# Altium schematic symbol library Resistor.SchLib: 1085 symbols (part 1 of 29)
Pins are listed as number, name and electrical type; pins without a type are passive.

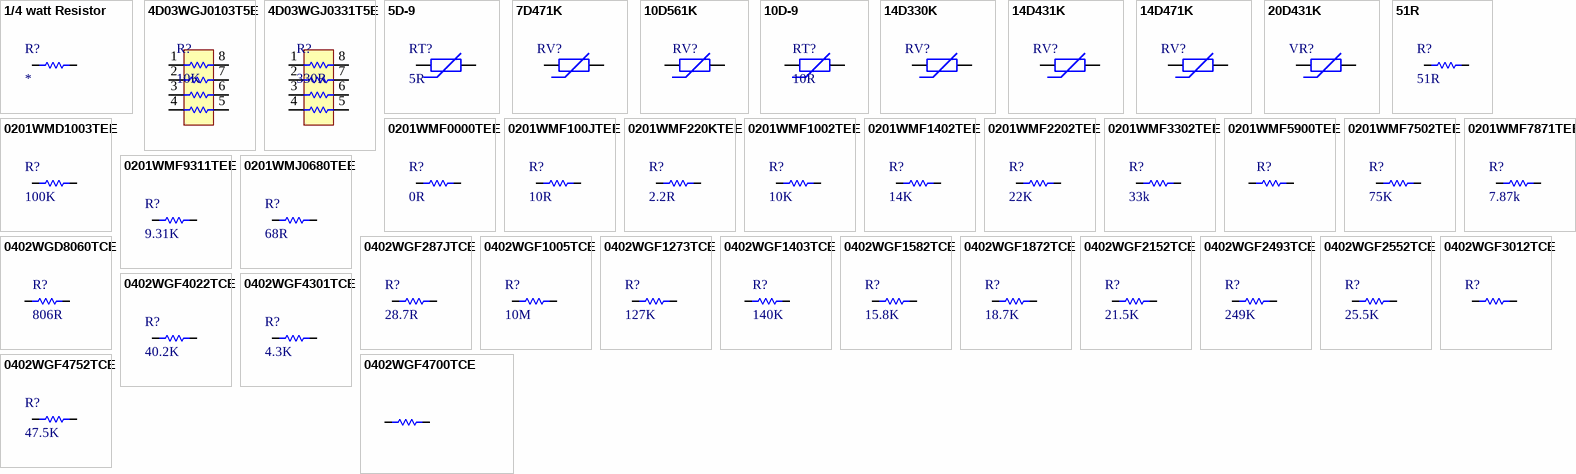
[diagram p0: symbols 1/4 watt Resistor to 0402WGF4752TCE]

## 1/4 watt Resistor
designator R?
footprint 1/4 WATT RESISTOR
pins: 1, 2

## 4D03WGJ0103T5E
designator R?, comment 10K
4 ±5% 10kΩ 62.5mW ±200ppm/℃ 0603x4 Resistor Networks, Arrays ROHS; Manufacturer: Royal Electronic Factory; Manufacturer Part Number: 4D03WGJ0103T5E; Value: 10kR; Temperature Coefficient: 400ppm/°C; Supplier: Mouser; LCSC Part Number: C29718; RoHS: No; Item Type: Resistor; Pricing: 10000=0.005 (USD); ComponentLink1URL: https://datasheet.octopart.com/4D03WGJ0103T5E-Royal-Ohm-datasheet-158295248.pdf?src-supplier=TME; ComponentLink1Description: https://datasheet.octopart.com/4D03WGJ0103T5E-Royal-Ohm-datasheet-158295248.pdf?src-supplier=TME
footprint 0603x4
pins: 1, 2, 3, 4, 5, 6, 7, 8

## 4D03WGJ0331T5E
designator R?, comment 330R
4 8 ±5% 330Ω 62.5mW ±200ppm/℃ 0603x4 Resistor Networks & Arrays ROHS; Manufacturer: UNI-ROYAL(Uniroyal Elec); Manufacturer Part Number: 4D03WGJ0331T5E; Package: 0603x4; LCSC Part Number: C12018; Item Type: Resistor; ComponentLink1Description: LCSC; ComponentLink1URL: https://www.lcsc.com/product-detail/span-style-background-color-ff0-Resistor-span-Networks-Arrays_UNI-ROYAL-Uniroyal-Elec-4D03WGJ0331T5E_C12018.html
footprint Resistor 0603x4
pins: 1, 2, 3, 4, 5, 6, 7, 8

## 5D-9
designator RT?, comment 5R
5Ω 3A 2700K Plugin,P=7.5mm NTC Thermistors ROHS; Manufacturer: Hongzhi; Manufacturer Part Number: 5D-9; Package: Plugin,P=7.5mm; LCSC Part Number: C332361; Item Type: NTC Thermistor; ComponentLink1Description: LCSC; ComponentLink1URL: https://www.lcsc.com/product-detail/NTC-Thermistors_Hongzhi-Elec-5D-9_C332361.html
footprint 5D-9
pins: 1, 2

## 7D471K
designator RV?
775V 385V 300V 423V~517V Plugin Varistors ROHS; Manufacturer: Hongzhi Elec; Manufacturer Part Number: 7D471K; Package: Plugin; JLCPCB Part Number: C111187; Item Type: Varistor; ComponentLink1Description: LCSC; ComponentLink1URL: https://www.lcsc.com/product-detail/Varistors_Hongzhi-Elec-7D471K_C111187.html
footprint 7D471K
pins: 1, 2

## 10D561K
designator RV?
925V 460V 350V 504V~616V Plugin,P=7.5mm Varistors ROHS; Manufacturer: Hongzhi Elec; Manufacturer Part Number: 10D561K; Package: Plugin,P=7.5mm; LCSC Part Number: C113236; Item Type: Varistor; ComponentLink1Description: LCSC; ComponentLink1URL: https://www.lcsc.com/product-detail/Varistors_Hongzhi-Elec-10D561K_C113236.html
footprint 10D561K
pins: 1, 2

## 10D-9
designator RT?, comment 10R
10Ω 2A 2700K Plugin,P=7.5mm NTC Thermistors ROHS; Manufacturer: SURGING; Manufacturer Part Number: 10D-9; Package: Plugin,P=7.5mm; LCSC Part Number: C2839611; Item Type: NTC Thermistor; ComponentLink1Description: LCSC; ComponentLink1URL: https://www.lcsc.com/product-detail/NTC-Thermistors_SURGING-10D-9_C2839611.html
footprint 10D-9
pins: 1, 2

## 14D330K
designator RV?
65V 5.9J 8500pF@1kHz 26V 20V 30V~36V 1kA Radial Leaded Varistors ROHS; Manufacturer: SEMBO; Manufacturer Part Number: 14D330K; Item Type: Thermistor; Footprint: Plugin; ComponentLink1Description: LCSC; ComponentLink1URL: https://lcsc.com/product-detail/Varistors_Hongzhi-Elec-14D330K_C137829.html; LCSC Part Number: C782663
footprint 14D330K_
pins: 1, 2

## 14D431K
designator RV?
710V 350V 275V 387V~473V Plugin Varistors ROHS; Manufacturer: Hongzhi Elec; Manufacturer Part Number: 14D431K; Package: Plugin; LCSC Part Number: C137830; Item Type: Varistor; ComponentLink1Description: LCSC; ComponentLink1URL: https://www.lcsc.com/product-detail/Varistors_Hongzhi-Elec-14D431K_C137830.html
footprint 14D431K
pins: 1, 2

## 14D471K
designator RV?
775V 385V 300V 423V~517V Plugin Varistors ROHS; Manufacturer: COV; Manufacturer Part Number: 14D471K; Package: Plugin; LCSC Part Number: C317828; Item Type: Varistor; ComponentLink1Description: LCSC; ComponentLink1URL: https://www.lcsc.com/product-detail/Varistors_COV-14D471K_C317828.html
footprint 14d471k
pins: 1, 2

## 20D431K
designator VR?
710V 350V 275V Through Hole,P=10mm Varistors ROHS; Manufacturer: SURGING; Manufacturer Part Number: 20D431K; Package: Through Hole,P=10mm; LCSC Part Number: C2839534; Item Type: Varistor; ComponentLink1Description: LCSC; ComponentLink1URL: https://www.lcsc.com/product-detail/C2839534.html
footprint 20D431K
pins: 1, 2

## 51R
designator R?
SMD 2512 1% Resistor 51R 1W; Manufacturer: IBUW; Manufacturer Part Number: 51R 1W; Value: 51R; Package: 2512; ComponentLink1Description: Aliexpress; ComponentLink1URL: https://fr.aliexpress.com/item/1005004709078383.html?spm=a2g0o.productlist.main.57.6d95f397cf7gmb&algo_pvid=edcdcb7e-db68-42b8-a831-237760419952&algo_exp_id=edcdcb7e-db68-42b8-a831-237760419952-28&pdp_npi=4%40dis%21USD%211.74%211.13%21%21%211.74%21%21%40210321dc17013352231813956e2690%2112000030183281143%21sea%21FR%210%21AB&curPageLogUid=DS5ZvT9x3Or6; Item Type: Resistor
footprint RES-2512
pins: 1, 2

## 0201WMD1003TEE
designator R?, comment 100K
50mW Thick Film Resistors ±0.5% 100kΩ 0201 Chip Resistor - Surface Mount ROHS; Manufacturer: UNI-ROYAL; Manufacturer Part Number: 0201WMD1003TEE; Package: 0201; LCSC Part Number: C778396; Item Type: Resistor; ComponentLink1Description: LCSC; ComponentLink1URL: https://www.lcsc.com/product-detail/Chip-Resistor-Surface-Mount_UNI-ROYAL-Uniroyal-Elec-0201WMD1003TEE_C778396.html
footprint Res-0201
pins: 1, 2

## 0201WMF0000TEE
designator R?, comment 0R
50mW Thick Film Resistors 25V ±1% 0Ω 0201 Chip Resistor - Surface Mount ROHS; Manufacturer: UNI-ROYAL; Manufacturer Part Number: 0201WMF0000TEE; Package: 0201; LCSC Part Number: C473473; Item Type: Resistor; ComponentLink1Description: LCSC; ComponentLink1URL: https://www.lcsc.com/product-detail/Chip-Resistor-Surface-Mount_UNI-ROYAL-Uniroyal-Elec-0201WMF0000TEE_C473473.html
footprint Res-0201
pins: 1, 2

## 0201WMF100JTEE
designator R?, comment 10R
50mW Thick Film Resistors 25V ±1% ±200ppm/℃ 10Ω 0201 Chip Resistor - Surface Mount ROHS; Manufacturer: UNI-ROYAL; Manufacturer Part Number: 0201WMF100JTEE; Package: 0201; LCSC Part Number: C270817; Item Type: Resistor; ComponentLink1Description: LCSC; ComponentLink1URL: https://www.lcsc.com/product-detail/Chip-Resistor-Surface-Mount_UNI-ROYAL-Uniroyal-Elec-0201WMF100JTEE_C270817.html
footprint Res-0201
pins: 1, 2

## 0201WMF220KTEE
designator R?, comment 2.2R
50mW Thick Film Resistors 25V ±1% -100ppm/℃~+350ppm/℃ 2.2Ω 0201 Chip Resistor - Surface Mount ROHS; Manufacturer: UNI-ROYAL; Manufacturer Part Number: 0201WMF220KTEE; Package: 0201; LCSC Part Number: C473517; Item Type: Resistor; ComponentLink1Description: LCSC; ComponentLink1URL: https://www.lcsc.com/product-detail/Chip-Resistor-Surface-Mount_UNI-ROYAL-Uniroyal-Elec-0201WMF220KTEE_C473517.html
footprint Res-0201
pins: 1, 2

## 0201WMF1002TEE
designator R?, comment 10K
50mW Thick Film Resistors 25V ±1% ±200ppm/℃ 10kΩ 0201 Chip Resistor - Surface Mount ROHS; Manufacturer: UNI-ROYAL; Manufacturer Part Number: 0201WMF1002TEE; Package: 0201; LCSC Part Number: C473048; Item Type: Resistor; ComponentLink1Description: LCSC; ComponentLink1URL: https://www.lcsc.com/product-detail/Chip-Resistor-Surface-Mount_UNI-ROYAL-Uniroyal-Elec-0201WMF1002TEE_C473048.html
footprint Res-0201
pins: 1, 2

## 0201WMF1402TEE
designator R?, comment 14K
50mW Thick Film Resistor 25V ±1% ±200ppm/℃ 14kΩ 0201 Chip Resistor - Surface Mount ROHS; Manufacturer: UNI-ROYAL; Manufacturer Part Number: 0201WMF1402TEE; Package: 0201; LCSC Part Number: C474280; Item Type: Resistor; ComponentLink1Description: LCSC; ComponentLink1URL: https://www.lcsc.com/product-detail/C474280.html
footprint Res-0201
pins: 1, 2

## 0201WMF2202TEE
designator R?, comment 22K
50mW Thick Film Resistors ±1% ±200ppm/℃ 22kΩ 0201 Chip Resistor - Surface Mount ROHS; Manufacturer: UNI-ROYAL; Manufacturer Part Number: 0201WMF2202TEE; Package: 0201; LCSC Part Number: C473469; Item Type: Resistor; ComponentLink1Description: LCSC; ComponentLink1URL: https://www.lcsc.com/product-detail/Chip-Resistor-Surface-Mount_UNI-ROYAL-Uniroyal-Elec-0201WMF2202TEE_C473469.html
footprint Res-0201
pins: 1, 2

## 0201WMF3302TEE
designator R?, comment 33k
50mW Thick Film Resistors ±1% ±200ppm/℃ 33kΩ 0201 Chip Resistor - Surface Mount ROHS; Manufacturer: UNI-ROYAL; Manufacturer Part Number: 0201WMF3302TEE; Package: 0201; LCSC Part Number: C473534; Item Type: Resistor; ComponentLink1Description: LCSC; ComponentLink1URL: https://www.lcsc.com/product-detail/Chip-Resistor-Surface-Mount_UNI-ROYAL-Uniroyal-Elec-0201WMF3302TEE_C473534.html
footprint Res-0201
pins: 1, 2

## 0201WMF5900TEE
designator R?
50mW Thick Film Resistors 25V ±1% ±200ppm/℃ 590Ω 0201 Chip Resistor - Surface Mount ROHS; Manufacturer: UNI-ROYAL; Manufacturer Part Number: 0201WMF5900TEE; Package: 0201; LCSC Part Number: C474302; Item Type: Resistor; ComponentLink1Description: LCSC; ComponentLink1URL: https://www.lcsc.com/product-detail/Chip-Resistor-Surface-Mount_UNI-ROYAL-Uniroyal-Elec-0201WMF5900TEE_C474302.html
footprint Res-0201
pins: 1, 2

## 0201WMF7502TEE
designator R?, comment 75K
50mW Thick Film Resistors 25V ±1% ±200ppm/℃ 75kΩ 0201 Chip Resistor - Surface Mount ROHS; Manufacturer: UNI-ROYAL; Manufacturer Part Number: 0201WMF7502TEE; Package: 0201; LCSC Part Number: C270339; Item Type: Resistor; ComponentLink1Description: LCSC; ComponentLink1URL: https://www.lcsc.com/product-detail/Chip-Resistor-Surface-Mount_UNI-ROYAL-Uniroyal-Elec-0201WMF7502TEE_C270339.html
footprint Res-0201
pins: 1, 2

## 0201WMF7871TEE
designator R?, comment 7.87k
50mW Thick Film Resistors ±1% 7.87kΩ 0201 Chip Resistor - Surface Mount ROHS; Manufacturer: UNI-ROYAL(Uniroyal Elec); Manufacturer Part Number: 0201WMF7871TEE; Package: 0201; LCSC Part Number: C473937; Item Type: Resistor; ComponentLink1Description: LCSC; ComponentLink1URL: https://www.lcsc.com/product-detail/Chip-span-style-background-color-ff0-Resistor-span-Surface-Mount_UNI-ROYAL-Uniroyal-Elec-0201WMF7871TEE_C473937.html
footprint Res-0201
pins: 1, 2

## 0201WMF9311TEE
designator R?, comment 9.31K
50mW Thick Film Resistors ±1% ±200ppm/℃ 9.31kΩ 0201 Chip Resistor - Surface Mount ROHS; Manufacturer: UNI-ROYAL; Manufacturer Part Number: 0201WMF9311TEE; Package: 0201; LCSC Part Number: C423401; Item Type: Resistor; ComponentLink1Description: LCSC; ComponentLink1URL: https://www.lcsc.com/product-detail/Chip-Resistor-Surface-Mount_UNI-ROYAL-Uniroyal-Elec-0201WMF9311TEE_C423401.html
footprint Res-0201
pins: 1, 2

## 0201WMJ0680TEE
designator R?, comment 68R
50mW Thick Film Resistors ±5% ±200ppm/℃ 68Ω 0201 Chip Resistor - Surface Mount ROHS; Manufacturer: UNI-ROYAL; Manufacturer Part Number: 0201WMJ0680TEE; Footprint: 0201; ComponentLink1Description: LCSC; ComponentLink1URL: https://www.lcsc.com/product-detail/Chip-Resistor-Surface-Mount_UNI-ROYAL-Uniroyal-Elec-0201WMJ0680TEE_C473576.html; LCSC Part Number: C473576; Item Type: Resistor
footprint Res-0201
pins: 1, 2

## 0402WGD8060TCE
designator R?, comment 806R
62.5mW Thick Film Resistors 50V ±100ppm/℃ ±0.5% 806Ω 0402 Chip Resistor - Surface Mount ROHS; Manufacturer: UNI-ROYAL; Manufacturer Part Number: 0402WGD8060TCE; Package: 0402; LCSC Part Number: C423268; Item Type: Resistor; ComponentLink1Description: LCSC; ComponentLink1URL: https://www.lcsc.com/product-detail/Chip-Resistor-Surface-Mount_UNI-ROYAL-Uniroyal-Elec-0402WGD8060TCE_C423268.html
footprint Res-0402
pins: 1, 2

## 0402WGF287JTCE
designator R?, comment 28.7R
62.5mW Thick Film Resistors 50V ±100ppm/℃ ±1% 28.7Ω 0402 Chip Resistor - Surface Mount ROHS; Manufacturer: Royal Electronic Factory; Manufacturer Part Number: 0402WGF287JTCE; Supplier: Mouser; LCSC Part Number: C423197; RoHS: No; Item Type: Resistor
footprint Res-0402
pins: 1, 2

## 0402WGF1005TCE
designator R?, comment 10M
62.5mW Thick Film Resistors 50V ±1% ±200ppm/℃ 10MΩ 0402 Chip Resistor - Surface Mount ROHS; Manufacturer: Royal Electronic Factory; Manufacturer Part Number: 0402WGF1005TCE; Supplier: Mouser; LCSC Part Number: C26082; RoHS: Yes; Item Type: Resistor; Stock: 50000; Pricing: 10000=0.001 (USD)
footprint Res-0402
pins: 1, 2

## 0402WGF1273TCE
designator R?, comment 127K
62.5mW Thick Film Resistors 50V ±100ppm/℃ ±1% 127kΩ 0402 Chip Resistor - Surface Mount ROHS; Manufacturer: UNI-ROYAL; Manufacturer Part Number: 0402WGF1273TCE; Package: 0402; LCSC Part Number: C25751; Item Type: Resistor; ComponentLink1Description: LCSC; ComponentLink1URL: https://www.lcsc.com/product-detail/Chip-Resistor-Surface-Mount_UNI-ROYAL-Uniroyal-Elec-0402WGF1273TCE_C25751.html
footprint Res-0402
pins: 1, 2

## 0402WGF1403TCE
designator R?, comment 140K
62.5mW Thick Film Resistors 50V ±100ppm/℃ ±1% 140kΩ 0402 Chip Resistor - Surface Mount ROHS; Manufacturer: UNI-ROYAL; Manufacturer Part Number: 0402WGF1403TCE; Package: 0402; LCSC Part Number: C270645; Item Type: Resistor; ComponentLink1Description: LCSC; ComponentLink1URL: https://www.lcsc.com/product-detail/Chip-Resistor-Surface-Mount_UNI-ROYAL-Uniroyal-Elec-0402WGF1403TCE_C270645.html
footprint Res-0402
pins: 1, 2

## 0402WGF1582TCE
designator R?, comment 15.8K
62.5mW Thick Film Resistors 50V ±100ppm/℃ ±1% 15.8kΩ 0402 Chip Resistor - Surface Mount ROHS; Manufacturer: Royal Electronic Factory; Manufacturer Part Number: 0402WGF1582TCE; Value: 15.8kR; Supplier: Mouser; LCSC Part Number: C26956; RoHS: No; Item Type: Resistor; Stock: 10000; Pricing: 10000=0.004 (USD)
footprint Res-0402
pins: 1, 2

## 0402WGF1872TCE
designator R?, comment 18.7K
1/16W Thick Film Resistors 50V ±100ppm/℃ ±1% 18.7kΩ 0402 Chip Resistor - Surface Mount ROHS; Manufacturer: UNI-ROYAL(Uniroyal Elec); Manufacturer Part Number: 0402WGF1872TCE; Package: 0402; LCSC Part Number: C11476; Item Type: Resistor; ComponentLink1Description: LCSC; ComponentLink1URL: https://www.lcsc.com/product-detail/Chip-Resistor-Surface-Mount_UNI-ROYAL-Uniroyal-Elec-0402WGF1872TCE_C11476.html?s_z=n_CRCW040218K7FKED
footprint Res-0402
pins: 1, 2

## 0402WGF2152TCE
designator R?, comment 21.5K
62.5mW Thick Film Resistors 50V ±100ppm/℃ ±1% 21.5kΩ 0402 Chip Resistor - Surface Mount ROHS; Manufacturer: Uniroyal; Manufacturer Part Number: 0402WGF2152TCE; Supplier: LCSC; LCSC Part Number: C25872; RoHS: No; Item Type: Resistor
footprint Res-0402
pins: 1, 2

## 0402WGF2493TCE
designator R?, comment 249K
62.5mW Thick Film Resistors 50V ±100ppm/℃ ±1% 249kΩ 0402 Chip Resistor - Surface Mount ROHS; Manufacturer: Royal Electronic Factory; Manufacturer Part Number: 0402WGF2493TCE; Supplier: Mouser; Supplier Part Number: 303-0402WGF2493TCE; RoHS: No; Pricing: 10000=0.004 (USD); LCSC Part Number: C11425; Item Type: Resistor
footprint Res-0402
pins: 1, 2

## 0402WGF2552TCE
designator R?, comment 25.5K
62.5mW Thick Film Resistors 50V ±100ppm/℃ ±1% 25.5kΩ 0402 Chip Resistor - Surface Mount ROHS; Manufacturer: Royal Electronic Factory; Manufacturer Part Number: 0402WGF2552TCE; Value: 25.5kR; Supplier: Mouser; LCSC Part Number: C26970; RoHS: Yes; Item Type: Resistor; Pricing: 10000=0.004 (USD); RoHS Compliant: Yes
footprint Res-0402
pins: 1, 2

## 0402WGF3012TCE
designator R?
62.5mW Thick Film Resistors 50V ±100ppm/℃ ±1% 30.1kΩ 0402 Chip Resistor - Surface Mount ROHS; Manufacturer: UNI-ROYAL; Manufacturer Part Number: 0402WGF3012TCE; Package: 0402; LCSC Part Number: C29402; Item Type: Resistor; ComponentLink1Description: LCSC; ComponentLink1URL: https://www.lcsc.com/product-detail/Chip-Resistor-Surface-Mount_UNI-ROYAL-Uniroyal-Elec-0402WGF3012TCE_C29402.html
footprint Res-0402
pins: 1, 2

## 0402WGF4022TCE
designator R?, comment 40.2K
62.5mW Thick Film Resistors 50V ±100ppm/℃ ±1% 40.2kΩ 0402 Chip Resistor - Surface Mount ROHS; Manufacturer: Uniroyal; Manufacturer Part Number: 0402WGF4022TCE; Supplier: LCSC; LCSC Part Number: C25893; RoHS: No; Item Type: Resistor
footprint Res-0402
pins: 1, 2

## 0402WGF4301TCE
designator R?, comment 4.3K
62.5mW Thick Film Resistors 50V ±100ppm/℃ ±1% 4.3kΩ 0402 Chip Resistor - Surface Mount ROHS; Manufacturer: Royal Electronic Factory; Manufacturer Part Number: 0402WGF4301TCE; Value: 4.3kR; Temperature Coefficient: 100ppm/°C; Supplier: Mouser; Supplier Part Number: 303-0402WGF4301TCE; RoHS: No; Item Type: Resistor; Pricing: 10000=0.004 (USD); ComponentLink1URL: http://datasheet.octopart.com/0402WGF4301TCE-Royal-Ohm-datasheet-17591902.pdf?src-supplier=Mouser; ComponentLink1Description: http://datasheet.octopart.com/0402WGF4301TCE-Royal-Ohm-datasheet-17591902.pdf?src-supplier=Mouser; ComponentLink2URL: https://datasheet.octopart.com/0402WGF4301TCE-Royal-Ohm-datasheet-165785611.pdf?src-supplier=TME; ComponentLink2Description: https://datasheet.octopart.com/0402WGF4301TCE-Royal-Ohm-datasheet-165785611.pdf?src-supplier=TME; LCSC Part Number: C25899
footprint Res-0402
pins: 1, 2

## 0402WGF4700TCE
designator R?, comment 470R
62.5mW Thick Film Resistors ±100ppm/℃ ±1% 470Ω 0402 Chip Resistor - Surface Mount ROHS; Manufacturer: UNI-ROYAL; Manufacturer Part Number: 0402WGF4700TCE; Package: 0402; LCSC Part Number: C25117; Item Type: Resistor; ComponentLink1Description: LCSC; ComponentLink1URL: https://www.lcsc.com/product-detail/Chip-span-style-background-color-ff0-Resistor-span-Surface-Mount_UNI-ROYAL-Uniroyal-Elec-0402WGF4700TCE_C25117.html
footprint Res-0402
pins: 1, 2

## 0402WGF4752TCE
designator R?, comment 47.5K
62.5mW Thick Film Resistors 50V ±100ppm/℃ ±1% 47.5kΩ 0402 Chip Resistor - Surface Mount ROHS; Manufacturer: Uniroyal; Manufacturer Part Number: 0402WGF4752TCE; Supplier: LCSC; LCSC Part Number: C25896; RoHS: No; Item Type: Resistor
footprint Res-0402
pins: 1, 2

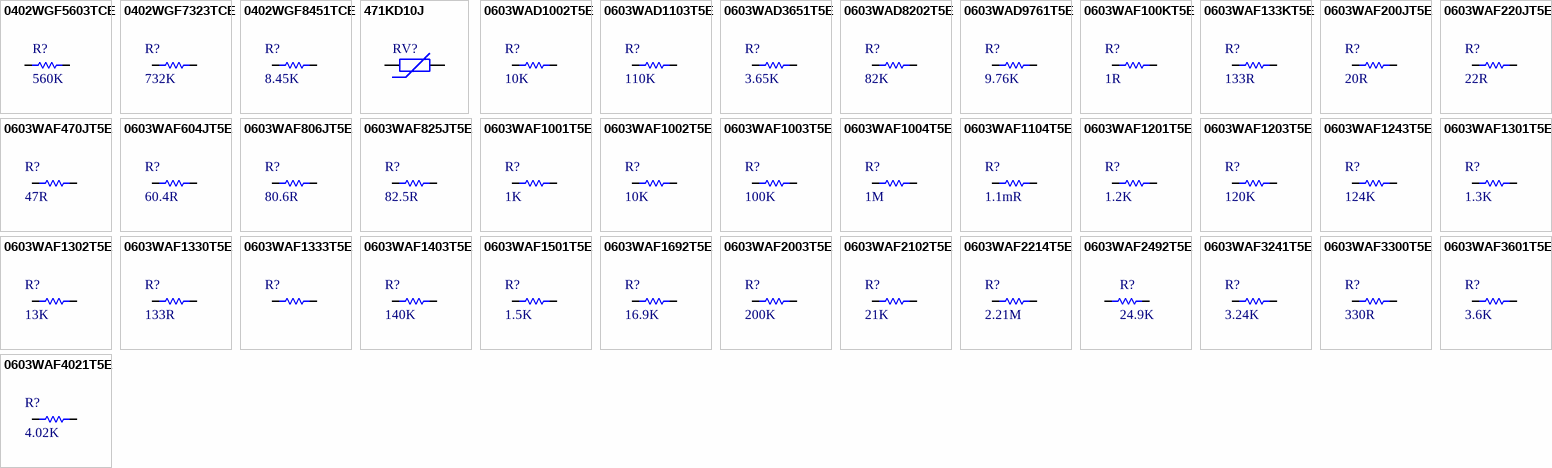
[diagram p1: symbols 0402WGF5603TCE to 0603WAF4021T5E]

## 0402WGF5603TCE
designator R?, comment 560K
62.5mW Thick Film Resistors 50V ±100ppm/℃ ±1% 560kΩ 0402 Chip Resistor - Surface Mount ROHS; Manufacturer: UNI-ROYAL(Uniroyal Elec); Manufacturer Part Number: 0402WGF5603TCE; Package: 0402; LCSC Part Number: C132339; Item Type: Resistor; ComponentLink1Description: LCSC; ComponentLink1URL: https://www.lcsc.com/product-detail/Chip-Resistor-Surface-Mount_UNI-ROYAL-Uniroyal-Elec-0402WGF5603TCE_C132339.html
footprint Res-0402
pins: 1, 2

## 0402WGF7323TCE
designator R?, comment 732K
1/16W Thick Film Resistors 50V ±100ppm/℃ ±1% 732kΩ 0402 Chip Resistor - Surface Mount ROHS; Manufacturer: Royal Electronic Factory; Manufacturer Part Number: 0402WGF7323TCE; Value: 732kR; Supplier: Mouser; LCSC Part Number: C27016; RoHS: No; Item Type: Resistor; Pricing: 10000=0.004 (USD)
footprint Res-0402
pins: 1, 2

## 0402WGF8451TCE
designator R?, comment 8.45K
62.5mW Thick Film Resistors 50V ±100ppm/℃ ±1% 8.45kΩ 0402 Chip Resistor - Surface Mount ROHS; Manufacturer: Royal Electronic Factory; Manufacturer Part Number: 0402WGF8451TCE; Supplier: Mouser; LCSC Part Number: C270579; RoHS: No; Item Type: Resistor; Pricing: 10000=0.004 (USD)
footprint Res-0402
pins: 1, 2

## 471KD10J
designator RV?
775V 385V 300V 470V Plugin Varistors ROHS; Manufacturer: Yageo; Manufacturer Part Number: 471KD10J; Supplier: Mouser; LCSC Part Number: C522648; RoHS: Yes; Item Type: Varistors; Stock: 1519; Pricing: 1=0.43, 10=0.27, 50=0.27, 100=0.187, 1000=0.145, 10000=0.096 (USD)
footprint 471KD10J
pins: 1, 2

## 0603WAD1002T5E
designator R?, comment 10K
100mW Thick Film Resistors 75V ±100ppm/℃ ±0.5% 10kΩ 0603 Chip Resistor - Surface Mount ROHS; Manufacturer: UNI-ROYAL; Manufacturer Part Number: 0603WAD1002T5E; ComponentLink1Description: LCSC; ComponentLink1URL: https://www.lcsc.com/product-detail/Chip-Resistor-Surface-Mount_UNI-ROYAL-Uniroyal-Elec-0603WAD1103T5E_C423090.html; Value: 10K; Footprint: 0603; LCSC Part Number: C167144; Item Type: Resistor
footprint Res-0603
pins: 1, 2

## 0603WAD1103T5E
designator R?, comment 110K
110kΩ 0603 Chip Resistor - Surface Mount ROHS; Manufacturer: UNI-ROYAL; Manufacturer Part Number: 0603WAD1103T5E; ComponentLink1Description: LCSC; ComponentLink1URL: https://www.lcsc.com/product-detail/Chip-Resistor-Surface-Mount_UNI-ROYAL-Uniroyal-Elec-0603WAD1103T5E_C423090.html; Value: 110K; Footprint: 0603; LCSC Part Number: C423090; Item Type: Resistor
footprint Res-0603
pins: 1, 2

## 0603WAD3651T5E
designator R?, comment 3.65K
100mW Thick Film Resistors 75V ±100ppm/℃ ±0.5% 3.65kΩ 0603 Chip Resistor - Surface Mount ROHS; Manufacturer: Royal Electronic Factory; Manufacturer Part Number: 0603WAD3651T5E; Supplier: Mouser; LCSC Part Number: C423042; Item Type: Resistor; Pricing: 10000=0.003 (USD); ComponentLink1Description: LCSC; ComponentLink1URL: https://www.lcsc.com/product-detail/Chip-Resistor-Surface-Mount_UNI-ROYAL-Uniroyal-Elec-0603WAD3651T5E_C423042.html
footprint Res-0603
pins: 1, 2

## 0603WAD8202T5E
designator R?, comment 82K
82kΩ 0603 Chip Resistor - Surface Mount ROHS; Manufacturer: UNI-ROYAL; Manufacturer Part Number: 0603WAD8202T5E; ComponentLink1Description: LCSC; ComponentLink1URL: https://lcsc.com/product-detail/Chip-span-style-background-color-ff0-Resistor-span-Surface-Mount_UNI-ROYAL-Uniroyal-Elec-0603WAD8202T5E_C407560.html; Footprint: 0603; LCSC Part Number: C407560; Item Type: Resistor
footprint Res-0603
pins: 1, 2

## 0603WAD9761T5E
designator R?, comment 9.76K
100mW Thick Film Resistors 75V ±100ppm/℃ ±0.5% 9.76kΩ 0603 Chip Resistor - Surface Mount ROHS; Manufacturer: UNI-ROYAL; Manufacturer Part Number: 0603WAD9761T5E; ComponentLink1Description: LCSC; ComponentLink1URL: https://www.lcsc.com/product-detail/Chip-Resistor-Surface-Mount_UNI-ROYAL-Uniroyal-Elec-0603WAD9761T5E_C423009.html; Value: 9.76K; Footprint: 0603; LCSC Part Number: C423009; Item Type: Resistor
footprint Res-0603
pins: 1, 2

## 0603WAF100KT5E
designator R?, comment 1R
1Ω 0603 100mW; Manufacturer: UNI-ROYAL; Manufacturer Part Number: 0603WAF100KT5E; Item Type: Resistor; ComponentLink1Description: LCSC; ComponentLink1URL: https://lcsc.com/product-detail/Chip-span-style-background-color-ff0-Resistor-span-Surface-Mount_UNI-ROYAL-Uniroyal-Elec-0603WAF100KT5E_C22936.html; Footprint: 0603; LCSC Part Number: C22936
footprint Res-0603
pins: 1, 2

## 0603WAF133KT5E
designator R?, comment 133R
1/10W Thick Film Resistors 75V ±1% ±200ppm/℃ -55℃~+155℃ 1.33Ω 0603 Chip Resistor - Surface Mount ROHS; Manufacturer: UNI-ROYAL; Manufacturer Part Number: 0603WAF133KT5E; Footprint: 0603; ComponentLink1Description: LCSC; ComponentLink1URL: https://lcsc.com/product-detail/Chip-span-style-background-color-ff0-Resistor-span-Surface-Mount_UNI-ROYAL-Uniroyal-Elec-0603WAF133KT5E_C247056.html; LCSC Part Number: C247056; Item Type: Resistor
footprint Res-0603
pins: 1, 2

## 0603WAF200JT5E
designator R?, comment 20R
100mW Thick Film Resistors ±100ppm/℃ ±1% 20Ω 0603 Chip Resistor - Surface Mount ROHS; Manufacturer Part Number: 0603WAF200JT5E; Manufacturer: UNI-ROYAL(Uniroyal Elec); LCSC Part Number: C22950; Package: 0603; Item Type: Resistor; ComponentLink1Description: LCSC; ComponentLink1URL: https://www.lcsc.com/product-detail/Chip-Resistor-Surface-Mount_UNI-ROYAL-Uniroyal-Elec-0603WAF200JT5E_C22950.html
footprint Res-0603
pins: 1, 2

## 0603WAF220JT5E
designator R?, comment 22R
100mW Thick Film Resistors 75V ±100ppm/℃ ±1% 22Ω 0603 Chip Resistor - Surface Mount ROHS; Manufacturer: UNI-ROYAL(Uniroyal Elec); Manufacturer Part Number: 0603WAF220JT5E; Value: 22R; Footprint: 0603; ComponentLink1Description: LCSC; ComponentLink1URL: https://www.lcsc.com/product-detail/Chip-Resistor-Surface-Mount_UNI-ROYAL-Uniroyal-Elec-0603WAF220JT5E_C23345.html; LCSC Part Number: C23345; Item Type: Resistor
footprint Res-0603
pins: 1, 2

## 0603WAF470JT5E
designator R?, comment 47R
100mW Thick Film Resistors 75V ±100ppm/℃ ±1% 47Ω 0603 Chip Resistor - Surface Mount ROHS; Manufacturer: UNI-ROYAL(Uniroyal Elec); Manufacturer Part no: 0603WAF470JT5E; Value: 47R; Package: 0603; ComponentLink1Description: LCSC; ComponentLink1URL: https://www.lcsc.com/product-detail/Chip-Resistor-Surface-Mount_UNI-ROYAL-Uniroyal-Elec-0603WAF470JT5E_C23182.html
footprint Res-0603
pins: 1, 2

## 0603WAF604JT5E
designator R?, comment 60.4R
100mW Thick Film Resistors 75V ±100ppm/℃ ±1% 60.4Ω 0603 Chip Resistor - Surface Mount ROHS; Manufacturer: Uniroyal; Manufacturer Part Number: 0603WAF604JT5E; Supplier: LCSC; LCSC Part Number: C23090; RoHS: No; Item Type: Resistor
footprint Res-0603
pins: 1, 2

## 0603WAF806JT5E
designator R?, comment 80.6R
100mW Thick Film Resistors ±1% ±200ppm/℃ 80.6Ω 0603 Chip Resistor - Surface Mount ROHS; Manufacturer: UNI-ROYAL(Uniroyal Elec); Manufacturer Part no: 0603WAF806JT5E; Value: 80.6R; Package: 0603; ComponentLink1Description: LCSC; ComponentLink1URL: https://www.lcsc.com/product-detail/Chip-Resistor-Surface-Mount_UNI-ROYAL-Uniroyal-Elec-0603WAF806JT5E_C23115.html
footprint Res-0603
pins: 1, 2

## 0603WAF825JT5E
designator R?, comment 82.5R
100mW Thick Film Resistors ±100ppm/℃ ±1% 82.5Ω 0603 Chip Resistor - Surface Mount ROHS; Manufacturer: UNI-ROYAL(Uniroyal Elec); Manufacturer Part no: 0603WAF825JT5E; Value: 82.5R; Package: 0603; ComponentLink1Description: LCSC; ComponentLink1URL: https://www.lcsc.com/product-detail/Chip-Resistor-Surface-Mount_UNI-ROYAL-Uniroyal-Elec-0603WAF825JT5E_C23117.html
footprint Res-0603
pins: 1, 2

## 0603WAF1001T5E
designator R?, comment 1K
0.1W Thick Film Resistors 75V ±100ppm/℃ ±1% 1kΩ 0603 Chip Resistor - Surface Mount ROHS; Manufacturer: UNI-ROYAL(Uniroyal Elec); Manufacturer Part Number: 0603WAF1001T5E; Package: 0603; LCSC Part Number: C21190; Item Type: Resistor; ComponentLink1Description: LCSC; ComponentLink1URL: https://www.lcsc.com/product-detail/Chip-Resistor-Surface-Mount_UNI-ROYAL-Uniroyal-Elec-0603WAF1001T5E_C21190.html?s_z=n_CRCW06031K00JNEA
footprint Res-0603
pins: 1, 2

## 0603WAF1002T5E
designator R?, comment 10K
100mW Thick Film Resistors 75V ±100ppm/℃ ±1% 10kΩ 0603 Chip Resistor - Surface Mount ROHS; Manufacturer: UNI-ROYAL(Uniroyal Elec); Manufacturer Part Number: 0603WAF1002T5E; Value: 10K; Package: 0603; ComponentLink1Description: LCSC; ComponentLink1URL: https://www.lcsc.com/product-detail/Chip-Resistor-Surface-Mount_UNI-ROYAL-Uniroyal-Elec-0603WAF1002T5E_C25804.html; LCSC Part Number: C25804; Item Type: Resistor
footprint Res-0603
pins: 1, 2

## 0603WAF1003T5E
designator R?, comment 100K
100mW Thick Film Resistors 75V ±100ppm/℃ ±1% 100kΩ 0603 Chip Resistor - Surface Mount ROHS; Manufacturer: UNI-ROYAL; Manufacturer Part Number: 0603WAF1003T5E; Package: 0603; LCSC Part Number: C25803; Item Type: Resistor; ComponentLink1Description: LCSC; ComponentLink1URL: https://www.lcsc.com/product-detail/Chip-Resistor-Surface-Mount_UNI-ROYAL-Uniroyal-Elec-0603WAF1003T5E_C25803.html
footprint Res-0603
pins: 1, 2

## 0603WAF1004T5E
designator R?, comment 1M
100mW Thick Film Resistors ±100ppm/℃ ±1% 1MΩ 0603 Chip Resistor - Surface Mount ROHS; Manufacturer: UNI-ROYAL(Uniroyal Elec); Manfacturer Part Number: 0603WAF1004T5E; LCSC Part Number: C22935; Package: 0603; Item Type: Resistor
footprint Res-0603
pins: 1, 2

## 0603WAF1104T5E
designator R?, comment 1.1mR
100mW Thick Film Resistors 75V ±100ppm/℃ ±1% 1.1MΩ 0603 Chip Resistor - Surface Mount ROHS; Manufacturer: Uniroyal; Manufacturer Part Number: 0603WAF1104T5E; Supplier: LCSC; LCSC Part Number: C13314; RoHS: No; Item Type: Resistor
footprint Res-0603
pins: 1, 2

## 0603WAF1201T5E
designator R?, comment 1.2K
Thick Film Resistors 75V 1.2kΩ 0603 Chip Resistor - Surface Mount ROHS; Manufacturer: UNI-ROYAL; Manufacturer Part Number: 0603WAF1201T5E; Footpint: 0603; Value: 1.2kΩ; ComponentLink1Description: LCSC; ComponentLink1URL: https://lcsc.com/product-detail/Chip-Resistor-Surface-Mount_UNI-ROYAL-Uniroyal-Elec-0603WAF1201T5E_C22765.html; LCSC Part Number: C22765; Item Type: Resistor
footprint Res-0603
pins: 1, 2

## 0603WAF1203T5E
designator R?, comment 120K
100mW Thick Film Resistors 75V ±100ppm/℃ ±1% 120kΩ 0603 Chip Resistor - Surface Mount ROHS; Manufacturer: UNI-ROYAL(Uniroyal Elec); Manufacturer Part Number: 0603WAF1203T5E; Package: 0603; ComponentLink1Description: LCSC; ComponentLink1URL: https://www.lcsc.com/product-detail/Chip-Resistor-Surface-Mount_UNI-ROYAL-Uniroyal-Elec-0603WAF1203T5E_C25808.html; LCSC Part Number: C25808; Item Type: Resistor
footprint RES-0603
pins: 1, 2

## 0603WAF1243T5E
designator R?, comment 124K
100mW Thick Film Resistors 75V ±100ppm/℃ ±1% 124kΩ 0603 Chip Resistor - Surface Mount ROHS; Manufacturer: Uniroyal; Manufacturer Part Number: 0603WAF1243T5E; Supplier: LCSC; LCSC Part Number: C22788; RoHS: No; Item Type: Resistor
footprint Res-0603
pins: 1, 2

## 0603WAF1301T5E
designator R?, comment 1.3K
100mW Thick Film Resistors 75V ±100ppm/℃ ±1% 1.3kΩ 0603 Chip Resistor - Surface Mount ROHS; Manufacturer: UNI-ROYAL; Manufacturer Part Number: 0603WAF1301T5E; Package: 0603; LCSC Part Number: C22767; Item Type: Resistor; ComponentLink1Description: LCSC; ComponentLink1URL: https://www.lcsc.com/product-detail/Chip-Resistor-Surface-Mount_UNI-ROYAL-Uniroyal-Elec-0603WAF1301T5E_C22767.html
footprint Res-0603
pins: 1, 2

## 0603WAF1302T5E
designator R?, comment 13K
100mW Thick Film Resistors ±100ppm/℃ ±1% 13kΩ 0603 Chip Resistor - Surface Mount ROHS; Manufacturer Part Number: 0603WAF1302T5E; Manufacturer: UNI-ROYAL; Package: 0603; LCSC Part Number: C22797; Item Type: Resistor; ComponentLink1Description: LCSC; ComponentLink1URL: https://www.lcsc.com/product-detail/Chip-Resistor-Surface-Mount_UNI-ROYAL-Uniroyal-Elec-0603WAF1302T5E_C22797.html
footprint Res-0603
pins: 1, 2

## 0603WAF1330T5E
designator R?, comment 133R
133Ω 0603 Chip Resistor - Surface Mount ROHS; Manufacturer: UNI-ROYAL; Manufacturer Part Number: 0603WAF1330T5E; ComponentLink1Description: LCSC; ComponentLink1URL: https://lcsc.com/product-detail/Chip-span-style-background-color-ff0-Resistor-span-Surface-Mount_UNI-ROYAL-Uniroyal-Elec-0603WAF1330T5E_C22871.html; Footprint: 0603; LCSC Part Number: C22871; Item Type: Resistor
footprint Res-0603
pins: 1, 2

## 0603WAF1333T5E
designator R?
100mW Thick Film Resistors 75V ±100ppm/℃ ±1% 133kΩ 0603 Chip Resistor - Surface Mount ROHS; Manufacturer: UNI-ROYAL; Manufacturer Part Number: 0603WAF1333T5E; Package: 0603; LCSC Part Number: C22870; Item Type: Resistor; ComponentLink1Description: LCSC; ComponentLink1URL: https://www.lcsc.com/product-detail/Chip-Resistor-Surface-Mount_UNI-ROYAL-Uniroyal-Elec-0603WAF1333T5E_C22870.html
footprint Res-0603
pins: 1, 2

## 0603WAF1403T5E
designator R?, comment 140K
100mW Thick Film Resistors 75V ±100ppm/℃ ±1% 140kΩ 0603 Chip Resistor - Surface Mount ROHS; Manufacturer Part Number: 0603WAF1403T5E; Manufacturer: UNI-ROYAL(Uniroyal Elec); LCSC Part Number: C22875; Package: 0603; Item Type: Resistor; ComponentLink1Description: LCSC; ComponentLink1URL: https://www.lcsc.com/product-detail/Chip-Resistor-Surface-Mount_UNI-ROYAL-Uniroyal-Elec-0603WAF1403T5E_C22875.html?s_z=n_0603WAF1403T5E
footprint Res-0603
pins: 1, 2

## 0603WAF1501T5E
designator R?, comment 1.5K
100mW Thick Film Resistors ±100ppm/℃ ±1% 1.5kΩ 0603 Chip Resistor - Surface Mount ROHS; Manufacturer Part Number: 0603WAF1501T5E; Manufacturer: UNI-ROYAL(Uniroyal Elec); Package: 0603; LCSC Part Number: C22843; Item Type: Resistor; ComponentLink1Description: LCSC; ComponentLink1URL: https://www.lcsc.com/product-detail/Chip-Resistor-Surface-Mount_UNI-ROYAL-Uniroyal-Elec-0603WAF1501T5E_C22843.html
footprint Res-0603
pins: 1, 2

## 0603WAF1692T5E
designator R?, comment 16.9K
100mW Thick Film Resistors 75V ±100ppm/℃ ±1% 16.9kΩ 0603 Chip Resistor - Surface Mount ROHS; Manufacturer: UNI-ROYAL; Manufacturer Part Number: 0603WAF1692T5E; Package: 0603; LCSC Part Number: C25954; Item Type: Resistor; ComponentLink1Description: LCSC; ComponentLink1URL: https://www.lcsc.com/product-detail/Chip-Resistor-Surface-Mount_UNI-ROYAL-Uniroyal-Elec-0603WAF1692T5E_C25954.html
footprint Res-0603
pins: 1, 2

## 0603WAF2003T5E
designator R?, comment 200K
100mW Thick Film Resistors 75V ±100ppm/℃ ±1% 200kΩ 0603 Chip Resistor - Surface Mount ROHS; Manufacturer Part Number: 0603WAF2003T5E; Manufacturer: UNI-ROYAL(Uniroyal Elec); LCSC Part Number: C25811; Package: 0603; Item Type: Resistor; ComponentLink1Description: LCSC; ComponentLink1URL: https://www.lcsc.com/product-detail/Chip-Resistor-Surface-Mount_UNI-ROYAL-Uniroyal-Elec-0603WAF2003T5E_C25811.html
footprint Res-0603
pins: 1, 2

## 0603WAF2102T5E
designator R?, comment 21K
100mW Thick Film Resistors 75V ±100ppm/℃ ±1% 21kΩ 0603 Chip Resistor - Surface Mount ROHS; Manufacturer: UNI-ROYAL(Uniroyal Elec); Manufacturer Part Number: 0603WAF2102T5E; Package: 0603; ComponentLink1Description: LCSC; ComponentLink1URL: https://www.lcsc.com/product-detail/Chip-Resistor-Surface-Mount_UNI-ROYAL-Uniroyal-Elec-0603WAF2102T5E_C22956.html; LCSC Part Number: C22956; Item Type: Resistor
footprint RES-0603
pins: 1, 2

## 0603WAF2214T5E
designator R?, comment 2.21M
100mW Thick Film Resistors 75V ±1% ±100ppm/℃ -55℃~+155℃ 2.21MΩ 0603 Chip Resistor - Surface Mount ROHS; Manufacturer: UNI-ROYAL(Uniroyal Elec); Manufacturer Part Number: 0603WAF2214T5E; Package: 0603; ComponentLink1Description: LCSC; ComponentLink1URL: https://www.lcsc.com/product-detail/Chip-span-style-background-color-ff0-Resistor-span-Surface-Mount_UNI-ROYAL-Uniroyal-Elec-0603WAF2214T5E_C422956.html; LCSC Part Number: C422956; Item Type: Resistor
footprint RES-0603
pins: 1, 2

## 0603WAF2492T5E
designator R?, comment 24.9K
100mW Thick Film Resistors 75V ±100ppm/℃ ±1% 24.9kΩ 0603 Chip Resistor - Surface Mount ROHS; Manufacturer: UNI-ROYAL(Uniroyal Elec); Manufacturer Part Number: 0603WAF2492T5E; Package: 0603; LCSC Part Number: C25962; Item Type: Resistor; ComponentLink1Description: LCSC; ComponentLink1URL: https://www.lcsc.com/product-detail/Chip-Resistor-Surface-Mount_UNI-ROYAL-Uniroyal-Elec-0603WAF2492T5E_C25962.html
footprint Res-0603
pins: 1, 2

## 0603WAF3241T5E
designator R?, comment 3.24K
100mW Thick Film Resistors ±1% 3.24kΩ 0603 Chip Resistor - Surface Mount ROHS; Manufacturer: UNI-ROYAL; Manufacturer Part Number: 0603WAF3241T5E; Package: 0603; LCSC Part Number: C22994; Item Type: Resistor; ComponentLink1Description: LCSC; ComponentLink1URL: https://www.lcsc.com/product-detail/Chip-Resistor-Surface-Mount_UNI-ROYAL-Uniroyal-Elec-0603WAF3241T5E_C22994.html
footprint Res-0603
pins: 1, 2

## 0603WAF3300T5E
designator R?, comment 330R
100mW Thick Film Resistors 75V ±100ppm/℃ ±1% 330Ω 0603 Chip Resistor - Surface Mount ROHS; Manufacturer: Royal Electronic Factory; Manufacturer Part Number: 0603WAF3300T5E; Supplier: Mouser; Supplier Part Number: 303-0603WAF3300T5E; RoHS: No; Item Type: Resistor; Stock: 210000; Pricing: 10000=0.001 (USD); Value: 330R; LCSC Part Number: C23138
footprint Res-0603
pins: 1, 2

## 0603WAF3601T5E
designator R?, comment 3.6K
100mW Thick Film Resistor 75V ±100ppm/℃ ±1% 3.6kΩ 0603 Chip Resistor - Surface Mount ROHS; Manufacturer: UNI-ROYAL(Uniroyal Elec); Manufacturer Part Number: 0603WAF3601T5E; Package: 0603; LCSC Part Number: C22980; Item Type: Resistor; ComponentLink1Description: LCSC; ComponentLink1URL: https://lcsc.com/product-detail/Chip-Resistor-Surface-Mount_UNI-ROYAL-Uniroyal-Elec-0603WAF3601T5E_C22980.html?s_z=n_AC0603FR-073K6L
footprint Res-0603
pins: 1, 2

## 0603WAF4021T5E
designator R?, comment 4.02K
4.02kΩ 0603 Chip Resistor - Surface Mount ROHS; Manufacturer: UNI-ROYAL; Manufacturer Part Number: 0603WAF4021T5E; Footprint: 0603; ComponentLink1Description: LCSC; ComponentLink1URL: https://www.lcsc.com/product-detail/Chip-span-style-background-color-ff0-Resistor-span-Surface-Mount_UNI-ROYAL-Uniroyal-Elec-0603WAF4021T5E_C23040.html; LCSC Part Number: C23040; Item Type: Resistor
footprint Res-0603
pins: 1, 2

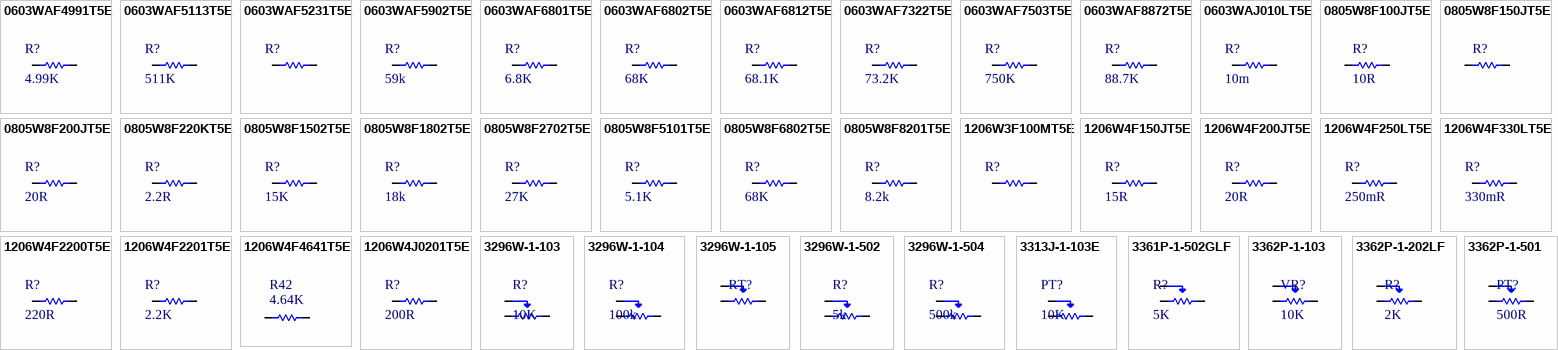
[diagram p2: symbols 0603WAF4991T5E to 3362P-1-501]

## 0603WAF4991T5E
designator R?, comment 4.99K
100mW Thick Film Resistors ±100ppm/℃ ±1% 1MΩ 0603 Chip Resistor - Surface Mount ROHS; Manufacturer: UNI-ROYAL(Uniroyal Elec); Manfacturer Part Number: 0603WAF4991T5E; LCSC Part Number: C23046; Package: 0603; Item Type: Resistor; ComponentLink1Description: LCSC; ComponentLink1URL: https://www.lcsc.com/product-detail/Chip-Resistor-Surface-Mount_UNI-ROYAL-Uniroyal-Elec-0603WAF4991T5E_C23046.html
footprint Res-0603
pins: 1, 2

## 0603WAF5113T5E
designator R?, comment 511K
100mW Thick Film Resistors 75V ±100ppm/℃ ±1% 511kΩ 0603 Chip Resistor - Surface Mount ROHS; Manufacturer: Royal Electronic Factory; Manufacturer Part Number: 0603WAF5113T5E; Supplier 1: Mouser; RoHS: No; Pricing 1: 10000=0.06400 (USD); Item Type: Resistor; LCSC Part Number: C23194; Supplier Part Number 1: 303-0603WAJ010LT5E
footprint REs-0603
pins: 1, 2

## 0603WAF5231T5E
designator R?
100mW Thick Film Resistor 75V ±100ppm/℃ ±1% 5.23kΩ 0603 Chip Resistor - Surface Mount ROHS; Manufacturer: UNI-ROYAL(Uniroyal Elec); Manufacturer Part Number: 0603WAF5231T5E; Package: 0603; LCSC Part Number: C23068; Item Type: Resistor; ComponentLink1Description: LCSC; ComponentLink1URL: https://lcsc.com/product-detail/Chip-Resistor-Surface-Mount_UNI-ROYAL-Uniroyal-Elec-0603WAF5231T5E_C23068.html?s_z=n_RTT035231FTP
footprint Res-0603
pins: 1, 2

## 0603WAF5902T5E
designator R?, comment 59k
100mW Thick Film Resistors 75V ±100ppm/℃ ±1% 59kΩ 0603 Chip Resistor - Surface Mount ROHS; Manufacturer: UNI-ROYAL(Uniroyal Elec); Manfacturer Part Number: 0603WAF5902T5E; LCSC Part Number: C23085; Package: 0603; Item Type: Resistor; ComponentLink1Description: LCSC; ComponentLink1URL: https://www.lcsc.com/product-detail/Chip-Resistor-Surface-Mount_UNI-ROYAL-Uniroyal-Elec-0603WAF5902T5E_C23085.html
footprint Res-0603
pins: 1, 2

## 0603WAF6801T5E
designator R?, comment 6.8K
100mW Thick Film Resistors 75V ±100ppm/℃ ±1% 6.8kΩ 0603 Chip Resistor - Surface Mount ROHS; Manufacturer: Royal Electronic Factory; Manufacturer Part Number: 0603WAF6801T5E; Value: 6.8kR; Supplier: Mouser; LCSC Part Number: C23212; RoHS: No; Item Type: Resistor; Stock: 40000; Pricing: 10000=0.001 (USD); ComponentLink1URL: https://datasheet.octopart.com/0603WAF6801T5E-Royal-Ohm-datasheet-165785611.pdf?src-supplier=TME; ComponentLink1Description: https://datasheet.octopart.com/0603WAF6801T5E-Royal-Ohm-datasheet-165785611.pdf?src-supplier=TME
footprint Res-0603
pins: 1, 2

## 0603WAF6802T5E
designator R?, comment 68K
100mW Thick Film Resistors 75V ±100ppm/℃ ±1% 68kΩ 0603 Chip Resistor - Surface Mount ROHS; Manufacturer: UNI-ROYAL(Uniroyal Elec); Manufacturer Part Number: 0603WAF6802T5E; Package: 0603; ComponentLink1Description: LCSC; ComponentLink1URL: https://www.lcsc.com/product-detail/Chip-Resistor-Surface-Mount_UNI-ROYAL-Uniroyal-Elec-0603WAF6802T5E_C23231.html; LCSC Part Number: C23231; Item Type: Resistor
footprint RES-0603
pins: 1, 2

## 0603WAF6812T5E
designator R?, comment 68.1K
100mW Thick Film Resistors 75V ±100ppm/℃ ±1% 68.1kΩ 0603 Chip Resistor - Surface Mount ROHS; Manufacturer: Uniroyal; Manufacturer Part Number: 0603WAF6812T5E; Supplier: LCSC; LCSC Part Number: C25976; RoHS: No; Item Type: Resistor
footprint Res-0603
pins: 1, 2

## 0603WAF7322T5E
designator R?, comment 73.2K
100mW Thick Film Resistors 75V ±100ppm/℃ ±1% 73.2kΩ 0603 Chip Resistor - Surface Mount ROHS; Manufacturer: Royal Electronic Factory; Manufacturer Part Number: 0603WAF7322T5E; Supplier 1: Mouser; RoHS: No; Pricing 1: 10000=0.06400 (USD); Item Type: Resistor; LCSC Part Number: C14890; Supplier Part Number 1: 303-0603WAJ010LT5E
footprint REs-0603
pins: 1, 2

## 0603WAF7503T5E
designator R?, comment 750K
100mW Thick Film Resistors 75V ±100ppm/℃ ±1% 750kΩ 0603 Chip Resistor - Surface Mount ROHS; Manufacturer: UNI-ROYAL; Manufacturer Part Number: 0603WAF7503T5E; Package: 0603; LCSC Part Number: C23240; Item Type: Resistor; ComponentLink1Description: LCSC; ComponentLink1URL: https://www.lcsc.com/product-detail/Chip-Resistor-Surface-Mount_UNI-ROYAL-Uniroyal-Elec-0603WAF7503T5E_C23240.html
footprint Res-0603
pins: 1, 2

## 0603WAF8872T5E
designator R?, comment 88.7K
100mW Thick Film Resistors 75V ±100ppm/℃ ±1% 88.7kΩ 0603 Chip Resistor - Surface Mount ROHS; Manufacturer: Uniroyal; Manufacturer Part Number: 0603WAF8872T5E; Supplier: LCSC; LCSC Part Number: C23258; RoHS: No; Item Type: Resistor
footprint Res-0603
pins: 1, 2

## 0603WAJ010LT5E
designator R?, comment 10m
100mW Thick Film Resistors 75V 10mΩ 0603 ROHS; Manufacturer: Royal Electronic Factory; Manufacturer Part Number: 0603WAJ010LT5E; Supplier 1: Mouser; RoHS: No; Pricing 1: 10000=0.06400 (USD); Item Type: Resistor; LCSC Part Number: C620909; Supplier Part Number 1: 303-0603WAJ010LT5E
footprint REs-0603
pins: 1, 2

## 0805W8F100JT5E
designator R?, comment 10R
125mW Thick Film Resistors 150V ±1% ±200ppm/℃ 10Ω 0805 Chip Resistor - Surface Mount ROHS; Manufacturer: Royal Electronic Factory; Manufacturer Part Number: 0805W8F100JT5E; Supplier: Mouser; LCSC Part Number: C17415; RoHS: No; Item Type: Resistor; Stock: 270000; Pricing: 10000=0.002 (USD); Value: 10R
footprint RES-0805 (SMD 0805)
pins: 1, 2

## 0805W8F150JT5E
designator R?
125mW Thick Film Resistors 150V ±100ppm/℃ ±1% 15Ω 0805 Chip Resistor - Surface Mount ROHS; Manufacturer: UNI-ROYAL; Manufacturer Part Number: 0805W8F150JT5E; Package: 0805; LCSC Part Number: C17480; Item Type: Resistor; ComponentLink1Description: LCSC; ComponentLink1URL: https://www.lcsc.com/product-detail/Chip-Resistor-Surface-Mount_UNI-ROYAL-Uniroyal-Elec-0805W8F150JT5E_C17480.html
footprint RES-0805 (SMD 0805)
pins: 1, 2

## 0805W8F200JT5E
designator R?, comment 20R
125mW Thick Film Resistors 150V ±1% ±200ppm/℃ 20Ω 0805 Chip Resistor - Surface Mount ROHS; Manufacturer: UNI-ROYAL; Manufacturer Part Number: 0805W8F200JT5E; Package: 0805; LCSC Part Number: C17544; Item Type: Resistor; ComponentLink1Description: LCSC; ComponentLink1URL: https://www.lcsc.com/product-detail/Chip-Resistor-Surface-Mount_UNI-ROYAL-Uniroyal-Elec-0805W8F200JT5E_C17544.html
footprint RES-0805 (SMD 0805)
pins: 1, 2

## 0805W8F220KT5E
designator R?, comment 2.2R
125mW Thick Film Resistors 150V ±1% ±400ppm/℃ 2.2Ω 0805 Chip Resistor - Surface Mount ROHS; Manufacturer: UNI-ROYAL; Manufacturer Part Number: 0805W8F220KT5E; Package: 0805; LCSC Part Number: C17521; Item Type: Resistor; ComponentLink1Description: LCSC; ComponentLink1URL: https://www.lcsc.com/product-detail/Chip-Resistor-Surface-Mount_UNI-ROYAL-Uniroyal-Elec-0805W8F220KT5E_C17521.html
footprint RES-0805 (SMD 0805)
pins: 1, 2

## 0805W8F1502T5E
designator R?, comment 15K
125mW Thick Film Resistors 150V ±100ppm/℃ ±1% 15kΩ 0805 Chip Resistor - Surface Mount ROHS; Manufacturer: Uniroyal; Manufacturer Part Number: 0805W8F1502T5E; Supplier: LCSC; LCSC Part Number: C17475; RoHS: Yes; Category: LDO; Item Type: Resistor
footprint RES-0805 (SMD 0805)
pins: 1, 2

## 0805W8F1802T5E
designator R?, comment 18k
125mW Thick Film Resistors 150V ±100ppm/℃ ±1% 18kΩ 0805 Chip Resistor - Surface Mount ROHS; Manufacturer: Royal Electronic Factory; Manufacturer Part Number: 0805W8F1802T5E; Value: 18kR; Supplier: Mouser; Supplier Part Number: 303-0805W8F1802T5E; RoHS: No; Stock: 80000; Pricing: 10000=0.002 (USD); LCSC Part Number: C17506; Item Type: Resistor
footprint RES-0805 (SMD 0805)
pins: 1, 2

## 0805W8F2702T5E
designator R?, comment 27K
125mW Thick Film Resistors 150V ±100ppm/℃ ±1% 27kΩ 0805 Chip Resistor - Surface Mount ROHS; Manufacturer: Royal Electronic Factory; Manufacturer Part Number: 0805W8F2702T5E; Value: 27kR; Supplier: Mouser; Supplier Part Number: 303-0805W8F2702T5E; RoHS: No; Item Type: Resistor; Stock: 75000; Pricing: 10000=0.002 (USD); LCSC Part Number: C17593
footprint RES-0805 (SMD 0805)
pins: 1, 2

## 0805W8F5101T5E
designator R?, comment 5.1K
125mW Thick Film Resistors 150V ±100ppm/℃ ±1% 5.1kΩ 0805 Chip Resistor - Surface Mount ROHS; Manufacturer: UNI-ROYAL; Manufacturer Part Number: 0805W8F5101T5E; Package: 0805; LCSC Part Number: C27834; Item Type: Resistor; ComponentLink1Description: LCSC; ComponentLink1URL: https://www.lcsc.com/product-detail/Chip-Resistor-Surface-Mount_UNI-ROYAL-Uniroyal-Elec-0805W8F5101T5E_C27834.html
footprint RES-0805 (SMD 0805)
pins: 1, 2

## 0805W8F6802T5E
designator R?, comment 68K
125mW Thick Film Resistors 150V ±100ppm/℃ ±1% 68kΩ 0805 Chip Resistor - Surface Mount ROHS; Manufacturer: Royal Electronic Factory; Manufacturer Part Number: 0805W8F6802T5E; Value: 68kR; Supplier: Mouser; Supplier Part Number: 303-0805W8F6802T5E; RoHS: Yes; Item Type: Resistor; Stock: 85000; Pricing: 10000=0.002 (USD); RoHS Compliant: Yes; LCSC Part Number: C17801
footprint RES-0805 (SMD 0805)
pins: 1, 2

## 0805W8F8201T5E
designator R?, comment 8.2k
125mW Thick Film Resistors 150V ±100ppm/℃ ±1% 8.2kΩ 0805 Chip Resistor - Surface Mount ROHS; Manufacturer: Royal Electronic Factory; Manufacturer Part Number: 0805W8F8201T5E; Value: 8.2kR; Supplier: Mouser; Supplier Part Number: 303-0805W8F8201T5E; RoHS: No; Item Type: Resistor; Pricing: 10000=0.002 (USD); LCSC Part Number: C17828
footprint RES-0805 (SMD 0805)
pins: 1, 2

## 1206W3F100MT5E
designator R?
333.333mW Thick Film Resistors 200V ±1% 10mΩ 1206 Chip Resistor - Surface Mount ROHS; Manufacturer: UNI-ROYAL(Uniroyal Elec); Manufacturer Part Number: 1206W3F100MT5E; Package: 1206; LCSC Part Number: C473031; Item Type: Resistor; ComponentLink1Description: LCSC; ComponentLink1URL: https://www.lcsc.com/product-detail/Chip-Resistor-Surface-Mount_UNI-ROYAL-Uniroyal-Elec-1206W3F100MT5E_C473031.html
footprint Res-1206
pins: 1, 2

## 1206W4F150JT5E
designator R?, comment 15R
250mW Thick Film Resistors 200V ±100ppm/℃ ±1% 15Ω 1206 Chip Resistor - Surface Mount ROHS; Manufacturer: Uniroyal; Manufacturer Part Number: 1206W4F150JT5E; Supplier: LCSC; LCSC Part Number: C17918; RoHS: No; Item Type: Resistor
footprint Res-1206
pins: 1, 2

## 1206W4F200JT5E
designator R?, comment 20R
0.25W Thick Film Resistors 200V ±100ppm/℃ ±1% 20Ω 1206 Chip Resistor - Surface Mount ROHS; Manufacturer: UNI-ROYAL(Uniroyal Elec); Manufacturer Part Number: 1206W4F200JT5E; Package: 1206; LCSC Part Number: C17955; Item Type: Resistor; ComponentLink1Description: LCSC; ComponentLink1URL: https://www.lcsc.com/product-detail/Chip-Resistor-Surface-Mount_UNI-ROYAL-Uniroyal-Elec-1206W4F200JT5E_C17955.html?s_z=n_CRCW120620R0FKEA
footprint Res-1206
pins: 1, 2

## 1206W4F250LT5E
designator R?, comment 250mR
0.25W Thick Film Resistors 200V ±800ppm/℃ ±1% 250mΩ 1206 Chip Resistor - Surface Mount ROHS; Manufacturer: UNI-ROYAL(Uniroyal Elec); Manufacturer Part Number: 1206W4F250LT5E; Package: 1206; LCSC Part Number: C49283; Item Type: Resistor; ComponentLink1Description: LCSC; ComponentLink1URL: https://www.lcsc.com/product-detail/Chip-Resistor-Surface-Mount_UNI-ROYAL-Uniroyal-Elec-1206W4F250LT5E_C49283.html?s_z=n_CSR1206FKR250
footprint Res-1206
pins: 1, 2

## 1206W4F330LT5E
designator R?, comment 330mR
250mW Thick Film Resistors ±800ppm/℃ ±1% 330mΩ 1206 Chip Resistor; Manufacturer: Uniroyal; Manufacturer Part Number: 1206W4F330LT5E; Footprint: 1206; LCSC Part Number: C25337; Item Type: Resistor; ComponentLink1Description: New link; ComponentLink1URL: https://www.lcsc.com/product-detail/Chip-Resistor-Surface-Mount_UNI-ROYAL-Uniroyal-Elec-1206W4F330LT5E_C25337.html
footprint Res-1206
pins: 1, 2

## 1206W4F2200T5E
designator R?, comment 220R
250mW Thick Film Resistors 200V ±100ppm/℃ ±1% 220Ω 1206 Chip Resistor - Surface Mount ROHS; Manufacturer: Uniroyal; Manufacturer Part Number: 1206W4F2200T5E; Supplier: LCSC; LCSC Part Number: C17957; RoHS: No; Category: LDO; Item Type: Resistor
footprint Res-1206
pins: 1, 2

## 1206W4F2201T5E
designator R?, comment 2.2K
250mW Thick Film Resistors 200V ±100ppm/℃ ±1% 2.2kΩ 1206 Chip Resistor - Surface Mount ROHS; Manufacturer: Uniroyal; Manufacturer Part Number: 1206W4F2201T5E; Supplier: LCSC; LCSC Part Number: C17948; RoHS: Yes; Category: LDO; RoHS Compliant: Yes; Item Type: Resistor
footprint Res-1206
pins: 1, 2

## 1206W4F4641T5E
designator R42, comment 4.64K
250mW Thick Film Resistors 200V ±100ppm/℃ ±1% 4.64kΩ 1206 Chip Resistor - Surface Mount ROHS; Manufacturer: UNI-ROYAL; Manufacturer Part Number: 1206W4F4641T5E; Footprint: 1206; ComponentLink1Description: JLCPCB; ComponentLink1URL: https://jlcpcb.com/kr/partdetail/244478-1206W4F4641T5E/C247270; JLC Part Number: C247270; Item Type: Resistor
footprint Res-1206
pins: 1, 2

## 1206W4J0201T5E
designator R?, comment 200R
250mW Thick Film Resistors 200V ±100ppm/℃ ±5% 200Ω 1206 Chip Resistor - Surface Mount ROHS; Manufacturer: UNI-ROYAL; Manufacturer Part Number: C25361; Package: 1206; LCSC Part Number: C25361; ComponentLink1Description: LCSC; ComponentLink1URL: Resistor
footprint Res-1206
pins: 1, 2

## 3296W-1-103
designator R?, comment 10K
TRIMMER 10K OHM 0.5W PC PIN TOP; Manufacturer: Bourns; Manufacturer Part Number: 3296W-1-103; Item Type: Potentiometers; Value: 10kR; Tolerance: 10%; Number of Turns: 25; Power Rating: 500mW; Temperature Coefficient: 100ppm/°C; Voltage Rating (DC): 500V; Supplier: Digikey; LCSC Part Number: 3296W-103-ND; RoHS: No; Stock: 436; Pricing: 1=4.37, 10=3.509, 25=3.2136, 50=3.0054, 100=2.8097, 300=2.52327, 500=2.3993, 1000=2.23977, 5000=1.90483 (USD); Mounting Technology: Through Hole,PCB; Weight: 0.03oz; Color: 48Colour; Contact Plating: Tin,Lead; Min Operating Temperature: -55°C; Max Operating Temperature: 125°C; Packaging: Rail/Tube; Termination: Pin; Resistor Type: Cermet; Taper: Linear; Max Power Dissipation: 500mW; Series: Trimpot® 3296 - Sealed; Technology: CERMET; Resistance Tolerance: 10%; Length: 9.53mm; Width: 9.53mm; Depth: 4.83mm; Thickness: 5.59mm; Radiation Hardening: No; RoHS Compliant: No; Military Standard: Not; Reach SVHC Compliant: No; ComponentLink1URL: https://datasheet.ciiva.com/1570/1815117-1570414.pdf?src-supplier=Newark; ComponentLink1Description: https://datasheet.ciiva.com/1570/1815117-1570414.pdf?src-supplier=Newark; ComponentLink2URL: https://datasheet.ciiva.com/3266/3296-3266186.pdf?src-supplier=Avnet; ComponentLink2Description: https://datasheet.ciiva.com/3266/3296-3266186.pdf?src-supplier=Avnet; ComponentLink3URL: https://datasheet.ciiva.com/2164/3296-2164077.pdf?src-supplier=Digikey; ComponentLink3Description: https://datasheet.ciiva.com/2164/3296-2164077.pdf?src-supplier=Digikey
footprint 3296W-1-103
pins: 1 CCW, 2 Wiper, 3 CW